# Altium footprint library FootPrintLib_9.PcbLib: 287 footprints (part 8 of 18)
Each footprint in its own frame and in the unit in brackets; x right, y up, seen from the top. Pads: shape width x height; smd on the part's side, far side on the other; paste and mask are expansions set on the pad; w line width, h text height; cw(c..) or ccw(c..) is an arc to the next point about the centre after c.
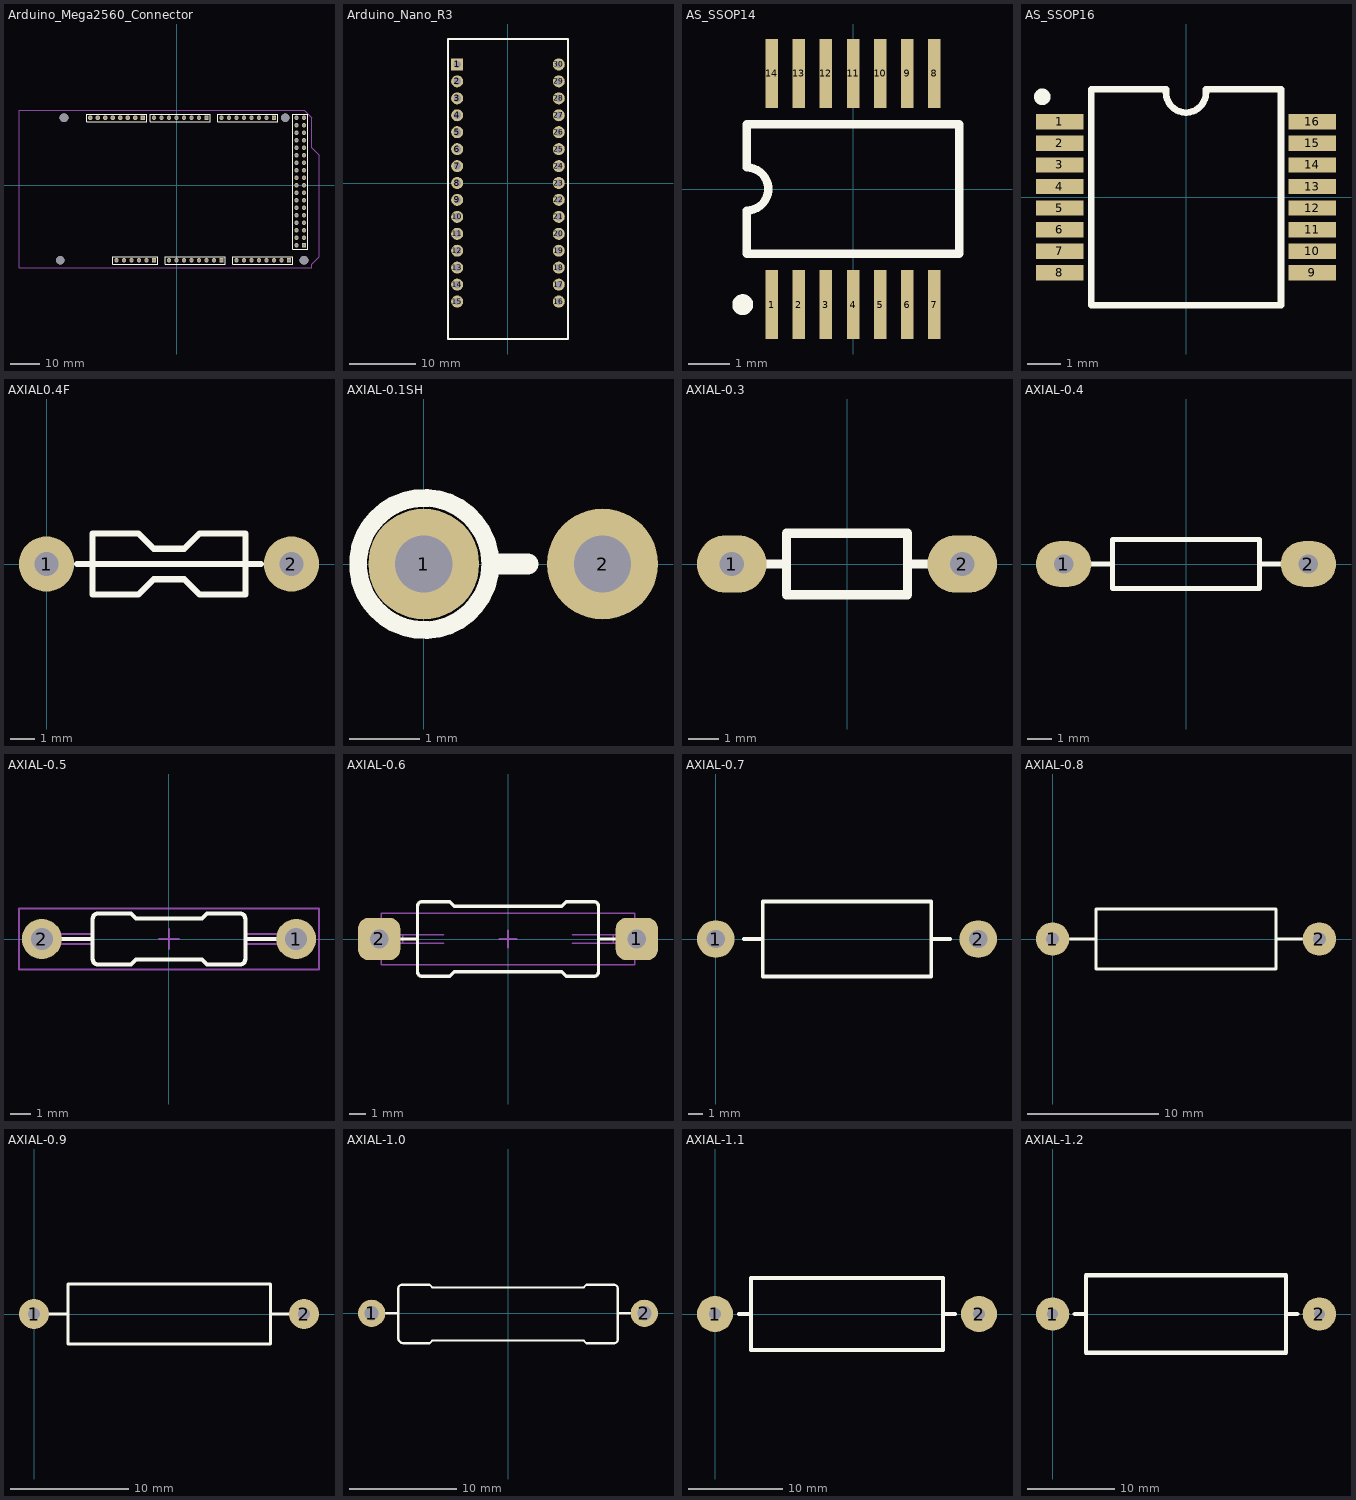
[diagram p7: the footprints below, top view; thin cyan lines are the x and y axes]

## Arduino_Mega2560_Connector [mm] "Arduino Mega2560 Connector"
pads (82):
  rect 1.5x1.5 hole 0.9: 0(10.16,22.86) 8(-11.43,22.86) 21(33.02,22.86) 59(-7.62,-25.4) 67(15.24,-25.4) 75(38.1,-25.4) 79(43.18,-20.32)
  round 1.5 hole 0.9: 1(7.62,22.86) 2(5.08,22.86) 3(2.54,22.86) 4(0,22.86) 5(-2.54,22.86) 6(-5.08,22.86) 7(-7.62,22.86) 9(-13.97,22.86) 10(-16.51,22.86) 11(-19.05,22.86) 12(-21.59,22.86) 13(-24.13,22.86) 14(15.24,22.86) 15(17.78,22.86) 16(20.32,22.86) 17(22.86,22.86) 18(25.4,22.86) 19(27.94,22.86) 20(30.48,22.86) 22(40.64,20.32) 23(43.18,20.32) 24(40.64,17.78) 25(43.18,17.78) 26(40.64,15.24) 27(43.18,15.24) 28(40.64,12.7) 29(43.18,12.7) 30(40.64,10.16) 31(43.18,10.16) 32(40.64,7.62) 33(43.18,7.62) 34(40.64,5.08) 35(43.18,5.08) 36(40.64,2.54) 37(43.18,2.54) 38(40.64,0) 39(43.18,0) 40(40.64,-2.54) 41(43.18,-2.54) 42(40.64,-5.08) 43(43.18,-5.08) 44(40.64,-7.62) 45(43.18,-7.62) 46(40.64,-10.16) 47(43.18,-10.16) 48(40.64,-12.7) 49(43.18,-12.7) 50(40.64,-15.24) 51(43.18,-15.24) 52(40.64,-17.78) 53(43.18,-17.78) 54(-20.32,-25.4) 55(-17.78,-25.4) 56(-15.24,-25.4) 57(-12.7,-25.4) 58(-10.16,-25.4) 60(-2.54,-25.4) 61(0,-25.4) 62(2.54,-25.4) 63(5.08,-25.4) 64(7.62,-25.4) 65(10.16,-25.4) 66(12.7,-25.4) 68(20.32,-25.4) 69(22.86,-25.4) 70(25.4,-25.4) 71(27.94,-25.4) 72(30.48,-25.4) 73(33.02,-25.4) 74(35.56,-25.4) 76(-26.67,22.86) 77(-29.21,22.86) 78(40.64,-20.32) 80(43.18,22.86) 81(40.64,22.86)
via 43.18,-25.4 diameter 3 hole 3
via 36.83,22.86 diameter 3 hole 3
via -38.1,22.86 diameter 3 hole 3
via -39.37,-25.4 diameter 3 hole 3
Top Overlay:
  lines w0.2: -30.48,21.59 -10.16,21.59 -10.16,24.13 -30.48,24.13 -30.48,21.59 ; -21.59,-26.67 -21.59,-24.13 -6.35,-24.13 -6.35,-26.67 -21.59,-26.67 ; -8.89,21.59 11.43,21.59 11.43,24.13 -8.89,24.13 -8.89,21.59 ; -3.81,-26.67 16.51,-26.67 16.51,-24.13 -3.81,-24.13 -3.81,-26.67 ; 13.97,21.59 13.97,24.13 34.29,24.13 34.29,21.59 13.97,21.59 ; 19.05,-26.67 39.37,-26.67 39.37,-24.13 19.05,-24.13 19.05,-26.67 ; 39.37,-21.59 44.45,-21.59 44.45,24.13 39.37,24.13 39.37,-21.59
Mechanical 1:
  lines w0.254: 45.72,12.69 48.26,10.15 48.26,-24.13 45.72,-26.67 45.72,-27.94 -51.7,-27.94 -53.34,-27.94 -53.34,-26.3 -53.34,25.4 43.18,25.4 45.72,22.86 45.72,12.7

## Arduino_Nano_R3 [mm] "Arduino Nano R3, 30-Leads, Row Spacing 15.24mm, Pitch 2.54mm"
height 13
pads (30):
  rect 1.8x1.8 hole 1.1: 1(-7.62,17.78)
  round 1.8 hole 1.1: 2(-7.62,15.24) 3(-7.62,12.7) 4(-7.62,10.16) 5(-7.62,7.62) 6(-7.62,5.08) 7(-7.62,2.54) 8(-7.62,0) 9(-7.62,-2.54) 10(-7.62,-5.08) 11(-7.62,-7.62) 12(-7.62,-10.16) 13(-7.62,-12.7) 14(-7.62,-15.24) 15(-7.62,-17.78) 16(7.62,-17.78) 17(7.62,-15.24) 18(7.62,-12.7) 19(7.62,-10.16) 20(7.62,-7.62) 21(7.62,-5.08) 22(7.62,-2.54) 23(7.62,0) 24(7.62,2.54) 25(7.62,5.08) 26(7.62,7.62) 27(7.62,10.16) 28(7.62,12.7) 29(7.62,15.24) 30(7.62,17.78)
Top Overlay:
  lines w0.254: -9,-23.4 -9,21.6 9,21.6 9,-23.4 -9,-23.4
3D body "arduino nano.STEP": height 12.72, standoff -5.88, extent -9,-23.4 9,21.6

## AS_SSOP14 [mm] "Shrink Small Outline, Plastic, Thin; 14 Leads; Body Width 4.4 mm; Pitch 0.65 mm"
height 1.1
pads (14):
  rect 0.3x1.65 smd: 1(-1.95,-2.775) 2(-1.3,-2.775) 3(-0.65,-2.775) 4(0,-2.775) 5(0.65,-2.775) 6(1.3,-2.775) 7(1.95,-2.775) 8(1.95,2.775) 9(1.3,2.775) 10(0.65,2.775) 11(0,2.775) 12(-0.65,2.775) 13(-1.3,2.775) 14(-1.95,2.775)
Top Overlay:
  circle w0.25: c-2.65,-2.775 r0.125
  lines w0.2: -2.55,-1.55 -2.55,-0.517 ccw(c-2.55,0) -2.55,0.517 -2.55,1.55 2.55,1.55 2.55,-1.55 -2.55,-1.55

## AS_SSOP16 [mm]
pads (16):
  rect 1.43x0.46 smd: 1(-3.8,2.275) 2(-3.8,1.625) 3(-3.8,0.975) 4(-3.8,0.325) 5(-3.8,-0.325) 6(-3.8,-0.975) 7(-3.8,-1.625) 8(-3.8,-2.275) 9(3.8,-2.275) 10(3.8,-1.625) 11(3.8,-0.975) 12(3.8,-0.325) 13(3.8,0.325) 14(3.8,0.975) 15(3.8,1.625) 16(3.8,2.275)
Top Overlay:
  circle w0.25: c-4.328,3.025 r0.125
  lines w0.2: -0.596,3.25 -2.853,3.25 -2.853,-3.25 2.859,-3.25 2.859,3.25 0.598,3.25 ; -0.592,3.246 ccw(c0,3.15) 0.592,3.246

## AXIAL0.4F [mil]
pads (2):
  round 90 hole 39.37: 1(0,0) 2(400,0)
Top Overlay:
  lines w10: 50,0 350,0 ; 75,-50 75,50 150,50 175,25 225,25 250,50 325,50 325,-50 250,-50 225,-25 175,-25 150,-50 75,-50

## AXIAL-0.1SH [mil] "Resistor"
pads (2):
  round 62 hole 32: 1(0,0) 2(100,0)
Top Overlay:
  circle w10: c0.26,0 r37.01
  lines w12: 39,0 58.07,0

## AXIAL-0.3 [mm] "Resistor"
pads (2):
  oval 2.3x1.9 hole 0.8: 1(-3.81,0) 2(3.81,0)
Top Overlay:
  lines w0.305: -2.769,0 -2,0 ; 2,0 2.769,0 ; -2,-1.016 2,-1.016 2,1.016 -2,1.016 -2,-1.016
3D body "User Library-1_8w_dip.step": height 1.92, standoff -3.98, extent -4,-0.911 4,0.889

## AXIAL-0.4 [mm] "Resistor"
height 2.032
pads (2):
  oval 2.3x1.9 hole 0.8: 1(-5.08,0) 2(5.08,0)
Top Overlay:
  lines w0.2: -4.064,0 -3.048,0 ; 3.048,0 4.064,0 ; -3.048,-1.016 -3.048,1.016 3.048,1.016 3.048,-1.016 -3.048,-1.016
3D body "User Library-Res40-Axial 0_25W-1K.STEP": height 2.41, standoff -2, extent -5.38,-1.2 5.38,1.2

## AXIAL-0.5 [mm] "Resistor"
height 2.54
pads (2):
  round 2 hole 1.1: 1(6.35,0) 2(-6.35,0)
Top Overlay:
  lines w0.2: -5.334,0 -3.81,0 ; 3.81,0 5.334,0 ; -3.81,-1.016 ccw(c-3.556,-1.016) -3.556,-1.27 -1.905,-1.27 -1.651,-1.016 1.651,-1.016 1.905,-1.27 3.556,-1.27 ccw(c3.556,-1.016) 3.81,-1.016 3.81,1.016 ccw(c3.556,1.016) 3.556,1.27 1.905,1.27 1.651,1.016 -1.651,1.016 -1.905,1.27 -3.556,1.27 ccw(c-3.556,1.016) -3.81,1.016 -3.81,-1.016
Mechanical 13:
  lines w0.1: -6.223,-0.254 -6.223,0.254 ; -3.81,-0.254 -6.477,-0.254 cw(c-6.477,-0.127) -6.604,-0.127 -6.604,0.127 cw(c-6.477,0.127) -6.477,0.254 -3.81,0.254 ; 3.81,-0.254 6.477,-0.254 ccw(c6.477,-0.127) 6.604,-0.127 6.604,0.127 ccw(c6.477,0.127) 6.477,0.254 3.81,0.254 ; 6.223,-0.254 6.223,0.254 ; -3.81,-1.016 ccw(c-3.556,-1.016) -3.556,-1.27 -1.905,-1.27 -1.651,-1.016 1.651,-1.016 1.905,-1.27 3.556,-1.27 ccw(c3.556,-1.016) 3.81,-1.016 3.81,1.016 ccw(c3.556,1.016) 3.556,1.27 1.905,1.27 1.651,1.016 -1.651,1.016 -1.905,1.27 -3.556,1.27 ccw(c-3.556,1.016) -3.81,1.016 -3.81,-1.016
Mechanical 15:
  lines w0.1: -0.508,0 0,0 ; 0,-0.508 0,0 ; 0,0.508 0,0 ; 0.508,0 0,0 ; -7.493,-1.524 7.493,-1.524 7.493,1.524 -7.493,1.524 -7.493,-1.524
3D body "Res-(0.25W)-500.step": height 2.93, standoff -2, extent -6.655,-1.156 6.655,1.156
3D body: height 1.3, standoff 0, extent -6.614,-0.264 -6.223,0.264
3D body: height 1.3, standoff 0, extent 6.223,-0.264 6.614,0.264

## AXIAL-0.6 [mm] "Resistor"
height 2.54
pads (2):
  rrect50% 2.5x2.5 hole 1.1: 1(7.62,0) 2(-7.62,0)
Top Overlay:
  lines w0.2: -6.874,0 -5.35,0 ; 5.35,0 6.874,0 ; -5.35,-1.946 ccw(c-5.096,-1.946) -5.096,-2.2 -3.445,-2.2 -3.191,-1.946 3.191,-1.946 3.445,-2.2 5.096,-2.2 ccw(c5.096,-1.946) 5.35,-1.946 5.35,1.946 ccw(c5.096,1.946) 5.096,2.2 3.445,2.2 3.191,1.946 -3.191,1.946 -3.445,2.2 -5.096,2.2 ccw(c-5.096,1.946) -5.35,1.946 -5.35,-1.946
Mechanical 13:
  lines w0.1: -6.223,-0.254 -6.223,0.254 ; -5.35,-1.946 ccw(c-5.096,-1.946) -5.096,-2.2 -3.445,-2.2 -3.191,-1.946 ; -5.35,-1.016 -5.35,1.016 ; -5.35,1.946 cw(c-5.096,1.946) -5.096,2.2 -3.445,2.2 -3.191,1.946 ; -3.81,-0.254 -6.477,-0.254 cw(c-6.477,-0.127) -6.604,-0.127 -6.604,0.127 cw(c-6.477,0.127) -6.477,0.254 -3.81,0.254 ; -1.651,-1.946 1.651,-1.946 ; -1.651,1.946 1.651,1.946 ; 3.191,-1.946 3.445,-2.2 5.096,-2.2 ccw(c5.096,-1.946) 5.35,-1.946 ; 3.191,1.946 3.445,2.2 5.096,2.2 cw(c5.096,1.946) 5.35,1.946 ; 3.81,-0.254 6.477,-0.254 ccw(c6.477,-0.127) 6.604,-0.127 6.604,0.127 ccw(c6.477,0.127) 6.477,0.254 3.81,0.254 ; 5.35,-1.016 5.35,1.016 ; 6.223,-0.254 6.223,0.254
Mechanical 15:
  lines w0.1: -0.508,0 0,0 ; 0,-0.508 0,0 ; 0,0.508 0,0 ; 0.508,0 0,0 ; -7.493,-1.524 -7.493,1.524 7.493,1.524 7.493,-1.524 -7.493,-1.524
3D body: height 1.3, standoff 0, extent 6.223,-0.264 6.614,0.264
3D body: height 1.3, standoff 0, extent -6.614,-0.264 -6.223,0.264
3D body "Res-(0.25W)-500.step": height 2.93, standoff -2, extent -6.655,-1.156 6.655,1.156

## AXIAL-0.7 [mm] "Resistor"
pads (2):
  round 2.54 hole 1.25: 1(0,0) 2(17.78,0)
Top Overlay:
  lines w0.254: 1.905,0 3.175,0 ; 14.605,0 15.875,0 ; 3.175,-2.54 3.175,2.54 14.605,2.54 14.605,-2.54 3.175,-2.54

## AXIAL-0.8 [mm] "Resistor"
pads (2):
  round 2.54 hole 1: 1(0,0) 2(20.32,0)
Top Overlay:
  lines w0.254: 1.016,0 3.302,0 ; 17.018,0 19.304,0 ; 3.302,-2.286 17.018,-2.286 17.018,2.286 3.302,2.286 3.302,-2.286

## AXIAL-0.9 [mil] "Resistor"
pads (2):
  round 100 hole 40: 1(0,0) 2(900,0)
Top Overlay:
  lines w10: 25,0 112.5,0 ; 787.5,0 875,0 ; 112.5,0 112.5,100 787.5,100 787.5,-100 112.5,-100 112.5,0

## AXIAL-1.0 [mil] "Resistor"
height 160
pads (2):
  round 100 hole 52: 1(-500,0) 2(500,0)
Top Overlay:
  lines w7.87: -472.5,0 -402.5,0 ; 67.5,-100 277.5,-100 287.5,-110 387.5,-110 ccw(c387.5,-95) 402.5,-95 402.5,-65 402.5,65 402.5,60 ; 82.5,-100 -277.5,-100 -287.5,-110 -382.5,-110 cw(c-382.5,-90) -402.5,-90 -402.5,-60 -402.5,65 -402.5,90 cw(c-387.5,90) -387.5,105 -382.5,105 -287.5,105 -277.5,95 67.5,95 277.5,95 287.5,105 387.5,105 cw(c387.5,90) 402.5,90 402.5,85 402.5,62.5 ; 402.5,0 472.5,0

## AXIAL-1.1 [mm] "Resistor"
pads (2):
  round 3.81 hole 1.27: 1(0,0) 2(27.94,0)
Top Overlay:
  lines w0.381: 2.54,0 3.81,0 ; 24.13,0 25.4,0 ; 3.81,0 3.81,-3.81 24.13,-3.81 24.13,3.81 3.81,3.81 3.81,0

## AXIAL-1.2 [mm] "Resistor"
pads (2):
  round 3.81 hole 1.27: 1(0,0) 2(30.48,0)
Top Overlay:
  lines w0.508: 2.54,0 3.81,0 ; 26.67,0 27.94,0 ; 3.81,0 3.81,4.445 26.67,4.445 26.67,-4.445 3.81,-4.445 3.81,0